# Altium schematic symbol library S2-LPCBQTR.SchLib: 1 symbol
Pins are listed as number, name and electrical type; pins without a type are passive.

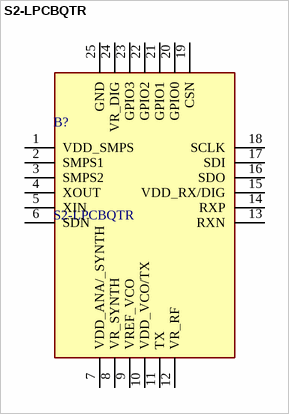
[diagram p0: symbol S2-LPCBQTR]

## S2-LPCBQTR
designator B?
Ultra-low power, high performance, sub-1GHz transceiver; Manufacturer_Name: STMicroelectronics; Geometry.Height: 1.05mm; Mouser Part Number: 511-S2-LPCBQTR; Mouser Price/Stock: https://www.mouser.co.uk/ProductDetail/STMicroelectronics/S2-LPCBQTR?qs=W0yvOO0ixfES%2FSAqpeZX6Q%3D%3D; Manufacturer_Part_Number: S2-LPCBQTR; Datasheet Link: https://www.st.com/resource/en/datasheet/s2-lp.pdf
footprint QFN50P400X400X105-25N-D
pins: 1 VDD_SMPS, 2 SMPS1, 3 SMPS2, 4 XOUT, 5 XIN, 6 SDN, 7 VDD_ANA/_SYNTH, 8 VR_SYNTH, 9 VREF_VCO, 10 VDD_VCO/TX, 11 TX, 12 VR_RF, 13 RXN, 14 RXP, 15 VDD_RX/DIG, 16 SDO, 17 SDI, 18 SCLK, 19 CSN, 20 GPIO0, 21 GPIO1, 22 GPIO2, 23 GPIO3, 24 VR_DIG, 25 GND